# Altium footprint library altiumll.PcbLib: 39 footprints (part 1 of 3)
Each footprint in its own frame and in the unit in brackets; x right, y up, seen from the top. Pads: shape width x height; smd on the part's side, far side on the other; paste and mask are expansions set on the pad; w line width, h text height; cw(c..) or ccw(c..) is an arc to the next point about the centre after c.
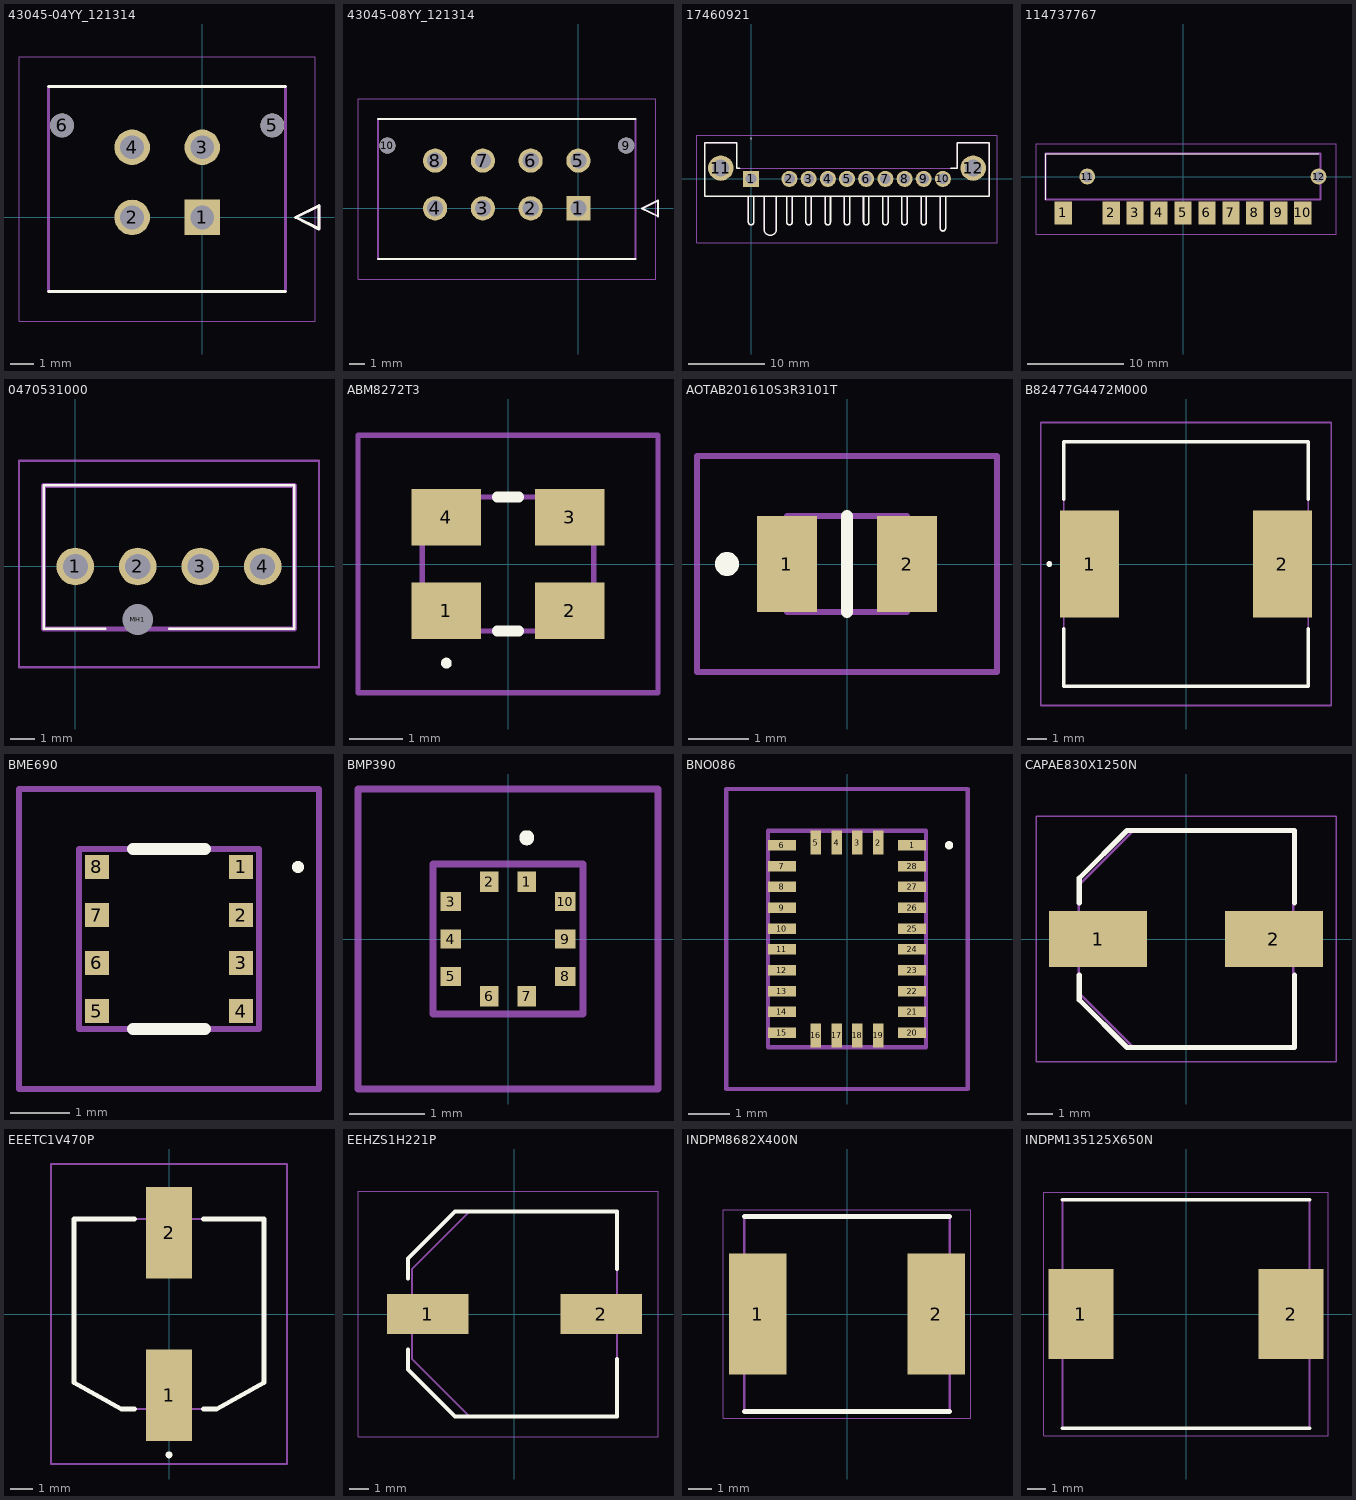
[diagram p0: the footprints below, top view; thin cyan lines are the x and y axes]

## 43045-04YY_121314 [mm]
pads (6):
  rect 1.52x1.52 hole 1.02: 1(0,0)
  round 1.52 hole 1.02: 2(-3,0) 3(0,3) 4(-3,3)
  round 1.02 hole 1.02 unplated: 5(3,3.94) 6(-6,3.94)
Top Overlay:
  lines w0.127: -6.575,-3.17 3.575,-3.17 ; -6.575,5.6 3.575,5.6 ; 4,0 5,-0.5 5,0.5 4,0
Mechanical 13:
  lines w0.127: -6.575,-3.17 3.575,-3.17 3.575,5.6 -6.575,5.6 -6.575,-3.17 ; 4,0 5,-0.5 5,0.5 4,0
Mechanical 15:
  lines w0.05: -7.845,-4.44 4.845,-4.44 4.845,6.87 -7.845,6.87 -7.845,-4.44
3D body "43045-0412.stp": height 9.85, standoff -3.23, extent -6.565,-2.44 3.585,6.33

## 43045-08YY_121314 [mm]
pads (10):
  rect 1.52x1.52 hole 1.02: 1(0,0)
  round 1.52 hole 1.02: 2(-3,0) 3(-6,0) 4(-9,0) 5(0,3) 6(-3,3) 7(-6,3) 8(-9,3)
  round 1.02 hole 1.02 unplated: 9(3,3.94) 10(-12,3.94)
Top Overlay:
  lines w0.127: -12.575,-3.17 3.575,-3.17 ; -12.575,5.6 3.575,5.6 ; 4,0 5,-0.5 5,0.5 4,0
Mechanical 13:
  lines w0.127: -12.575,-3.17 3.575,-3.17 3.575,5.6 -12.575,5.6 -12.575,-3.17 ; 4,0 5,-0.5 5,0.5 4,0
Mechanical 15:
  lines w0.05: -13.845,-4.44 4.845,-4.44 4.845,6.87 -13.845,6.87 -13.845,-4.44
3D body "43045-0812.stp": height 9.83, standoff -3.25, extent -12.575,-2.47 3.575,6.3

## 17460921 [mm]
pads (12):
  rect 2.1x2.1 hole 1.4: 1(0,0)
  round 2.1 hole 1.4: 2(5,0) 3(7.5,0) 4(10,0) 5(12.5,0) 6(15,0) 7(17.5,0) 8(20,0) 9(22.5,0) 10(25,0)
  round 3.3 hole 2.2: 11(-3.95,1.4) 12(28.95,1.4)
Top Overlay:
  lines w0.1: 0,5.2 cw(c0,5.25) 0,5.3 cw(c0,5.25) 0,5.2
  lines w0.2: -1.5,1.4 -1.85,1.4 -1.85,4.7 -6.05,4.7 -6.05,-2.3 31.05,-2.3 31.05,4.7 26.85,4.7 26.85,1.4 26,1.4 ; -0.35,-2.3 -0.35,-5.65 ccw(c0,-5.65) 0.35,-5.65 0.35,-2.3 ; 1.7,-2.3 1.7,-6.55 ccw(c2.5,-6.55) 3.3,-6.55 3.3,-2.3 ; 4.65,-2.3 4.65,-5.65 ccw(c5,-5.65) 5.35,-5.65 5.35,-2.3 ; 7.15,-2.3 7.15,-5.65 ccw(c7.5,-5.65) 7.85,-5.65 7.85,-2.3 ; 9.65,-2.3 9.65,-5.65 ccw(c10,-5.65) 10.35,-5.65 10.35,-2.3 ; 12.15,-2.3 12.15,-5.65 ccw(c12.5,-5.65) 12.85,-5.65 12.85,-2.3 ; 14.65,-2.3 14.65,-5.65 ccw(c15,-5.65) 15.35,-5.65 15.35,-2.3 ; 17.15,-2.3 17.15,-5.65 ccw(c17.5,-5.65) 17.85,-5.65 17.85,-2.3 ; 19.65,-2.3 19.65,-5.65 ccw(c20,-5.65) 20.35,-5.65 20.35,-2.3 ; 22.15,-2.3 22.15,-5.65 ccw(c22.5,-5.65) 22.85,-5.65 22.85,-2.3 ; 24.65,-2.3 24.65,-6.45 ccw(c25,-6.45) 25.35,-6.45 25.35,-2.3
Mechanical 13:
  lines w0.1: -0.35,-2.3 -0.35,-5.65 ccw(c0,-5.65) 0.35,-5.65 0.35,-2.3 ; 1.7,-2.3 1.7,-6.55 ccw(c2.5,-6.55) 3.3,-6.55 3.3,-2.3 ; 4.65,-2.3 4.65,-5.65 ccw(c5,-5.65) 5.35,-5.65 5.35,-2.3 ; 7.15,-2.3 7.15,-5.65 ccw(c7.5,-5.65) 7.85,-5.65 7.85,-2.3 ; 9.65,-2.3 9.65,-5.65 ccw(c10,-5.65) 10.35,-5.65 10.35,-2.3 ; 12.15,-2.3 12.15,-5.65 ccw(c12.5,-5.65) 12.85,-5.65 12.85,-2.3 ; 14.65,-2.3 14.65,-5.65 ccw(c15,-5.65) 15.35,-5.65 15.35,-2.3 ; 17.15,-2.3 17.15,-5.65 ccw(c17.5,-5.65) 17.85,-5.65 17.85,-2.3 ; 19.65,-2.3 19.65,-5.65 ccw(c20,-5.65) 20.35,-5.65 20.35,-2.3 ; 22.15,-2.3 22.15,-5.65 ccw(c22.5,-5.65) 22.85,-5.65 22.85,-2.3 ; 24.65,-2.3 24.65,-6.45 ccw(c25,-6.45) 25.35,-6.45 25.35,-2.3 ; -6.05,-2.3 31.05,-2.3 31.05,4.7 26.85,4.7 26.85,1.4 -1.85,1.4 -1.85,4.7 -6.05,4.7 -6.05,-2.3
Mechanical 15:
  lines w0.1: -7.05,-8.35 32.05,-8.35 32.05,5.7 -7.05,5.7 -7.05,-8.35
3D body "1746092-1.stp": height 4.79, standoff -2.06, extent -6.05,-7.35 31.05,4.7

## 114737767 [mm]
pads (12):
  rect 1.8x2.4 smd: 1(-12.5,-3.8) 2(-7.5,-3.8) 3(-5,-3.8) 4(-2.5,-3.8) 5(0,-3.8) 6(2.5,-3.8) 7(5,-3.8) 8(7.5,-3.8) 9(10,-3.8) 10(12.5,-3.8)
  round 1.65 hole 1.1: 11(-10,0) 12(14.15,0)
Top Overlay:
  lines w0.1: -14.35,-2.4 -14.35,2.4 14.15,2.4
Mechanical 13:
  lines w0.2: -14.35,-2.4 14.35,-2.4 14.35,2.4 -14.35,2.4 -14.35,-2.4
Mechanical 15:
  lines w0.1: -15.35,-6 15.975,-6 15.975,3.4 -15.35,3.4 -15.35,-6
3D body "1-1473776-7.stp": height 6.55, standoff -0.6, extent -16.35,-4.4 16.35,2.4

## 0470531000 [mm]
pads (5):
  round 1.53 hole 1.02: 1(0,0) 2(2.54,0) 3(5.08,0) 4(7.62,0)
  round 0.625 hole 1.25 unplated: MH1(2.54,-2.16)
Top Overlay:
  lines w0.1: 1.21,-2.54 -1.29,-2.54 -1.29,3.3 8.91,3.3 8.91,-2.54 3.81,-2.54
Mechanical 13:
  lines w0.2: -1.29,-2.54 -1.29,3.3 8.91,3.3 8.91,-2.54 -1.29,-2.54
Mechanical 15:
  lines w0.1: -2.29,-4.098 -2.29,4.3 9.91,4.3 9.91,-4.098 -2.29,-4.098
3D body "0470531000.stp": height 9.91, standoff -3.59, extent -1.29,-2.54 8.91,3.3

## ABM8272T3 [mm]
pads (4):
  rect 1.3x1.05 smd: 1(-1.15,-0.875) 2(1.15,-0.875) 3(1.15,0.875) 4(-1.15,0.875)
Top Overlay:
  lines w0.1: -1.15,-1.9 ccw(c-1.15,-1.85) -1.15,-1.8 ccw(c-1.15,-1.85) -1.15,-1.9
  lines w0.2: -0.2,-1.25 0.2,-1.25 ; -0.2,1.25 0.2,1.25
Mechanical 13:
  lines w0.1: -1.6,-1.25 1.6,-1.25 1.6,1.25 -1.6,1.25 -1.6,-1.25
Mechanical 15:
  lines w0.1: -2.8,-2.4 2.8,-2.4 2.8,2.4 -2.8,2.4 -2.8,-2.4
3D body "ABM8-272-T3.stp": height 0.75, standoff 0, extent -1.6,-1.25 1.6,1.25

## AOTAB201610S3R3101T [mm]
pads (2):
  rect 1x1.6 smd: 1(-1,0) 2(1,0)
Top Overlay:
  lines w0.2: 0,-0.8 0,0.8 ; -2,-0.1 cw(c-2,0) -2,0.1 cw(c-2,0) -2,-0.1
Mechanical 13:
  lines w0.1: -1,-0.8 1,-0.8 1,0.8 -1,0.8 -1,-0.8
Mechanical 15:
  lines w0.1: -2.5,-1.8 2.5,-1.8 2.5,1.8 -2.5,1.8 -2.5,-1.8
3D body "AOTA-B201610S3R3-101-T.stp": height 1, standoff 0, extent -1,-0.8 1,0.8

## B82477G4472M000 [mm]
pads (2):
  rect 3.1x5.6 smd: 1(-5.05,0) 2(5.05,0)
Top Overlay:
  lines w0.2: -7.2,0 ccw(c-7.15,0) -7.1,0 ; -7.2,0 cw(c-7.15,0) -7.1,0 ; -7.2,0 ccw(c-7.15,0) -7.1,0 ; -6.4,-6.4 6.4,-6.4 ; -6.4,-6.4 6.4,-6.4 ; -6.4,-6.4 -6.4,-3.4 -6.4,-6.4 ; -6.4,6.4 -6.4,3.4 -6.4,6.4 ; -6.4,6.4 6.4,6.4 ; -6.4,6.4 6.4,6.4 ; 6.4,-6.4 6.4,-3.4 6.4,-6.4 ; 6.4,6.4 6.4,3.4 6.4,6.4
Mechanical 13:
  lines w0.1: -6.4,-6.4 6.4,-6.4 6.4,6.4 -6.4,6.4 -6.4,-6.4
Mechanical 15:
  lines w0.1: -7.6,-7.4 7.6,-7.4 7.6,7.4 -7.6,7.4 -7.6,-7.4
3D body "B82477G4472M000.stp": height 7.56, standoff 0, extent -6,-6 6,6

## BME690 [mm]
pads (8):
  rect 0.4x0.4 smd: 1(1271.2,1271.2) 2(1271.2,1270.4) 3(1271.2,1269.6) 4(1271.2,1268.8) 5(1268.8,1268.8) 6(1268.8,1269.6) 7(1268.8,1270.4) 8(1268.8,1271.2)
Top Overlay:
  lines w0.1: 1272.1,1271.2 cw(c1272.15,1271.2) 1272.2,1271.2 cw(c1272.15,1271.2) 1272.1,1271.2
  lines w0.2: 1269.4,1268.5 1270.6,1268.5 ; 1269.4,1271.5 1270.6,1271.5
Mechanical 13:
  lines w0.1: 1268.5,1268.5 1271.5,1268.5 1271.5,1271.5 1268.5,1271.5 1268.5,1268.5
Mechanical 15:
  lines w0.1: 1267.5,1267.5 1272.5,1267.5 1272.5,1272.5 1267.5,1272.5 1267.5,1267.5
3D body "BME690.stp": height 0.96, standoff 0.01, extent 1268.5,1268.5 1271.5,1271.5

## BMP390 [mm]
pads (10):
  rect 0.25x0.275 smd: 1(0.25,0.763) 2(-0.25,0.763) 6(-0.25,-0.763) 7(0.25,-0.763)
  rect 0.275x0.25 smd: 3(-0.762,0.5) 4(-0.762,0) 5(-0.762,-0.5) 8(0.762,-0.5) 9(0.762,0) 10(0.762,0.5)
Top Overlay:
  lines w0.1: 0.25,1.3 ccw(c0.25,1.35) 0.25,1.4 ccw(c0.25,1.35) 0.25,1.3
Mechanical 13:
  lines w0.1: -1,-1 -1,1 1,1 1,-1 -1,-1
Mechanical 15:
  lines w0.1: -2,-2 -2,2 2,2 2,-2 -2,-2
3D body "BMP390.stp": height 0.73, standoff -0.02, extent -1,-1.08 1,0.92

## BNO086 [mm]
pads (28):
  rect 0.675x0.25 smd: 1(1.562,2.25) 6(-1.562,2.25) 7(-1.562,1.75) 8(-1.562,1.25) 9(-1.562,0.75) 10(-1.562,0.25) 11(-1.562,-0.25) 12(-1.562,-0.75) 13(-1.562,-1.25) 14(-1.562,-1.75) 15(-1.562,-2.25) 20(1.562,-2.25) 21(1.562,-1.75) 22(1.562,-1.25) 23(1.562,-0.75) 24(1.563,-0.25) 25(1.563,0.25) 26(1.562,0.75) 27(1.562,1.25) 28(1.562,1.75)
  rect 0.25x0.575 smd: 2(0.75,2.312) 3(0.25,2.312) 4(-0.25,2.312) 5(-0.75,2.312) 16(-0.75,-2.313) 17(-0.25,-2.313) 18(0.25,-2.313) 19(0.75,-2.313)
Top Overlay:
  lines w0.1: 2.4,2.25 ccw(c2.45,2.25) 2.5,2.25 ccw(c2.45,2.25) 2.4,2.25
Mechanical 13:
  lines w0.1: -1.9,-2.6 -1.9,2.6 1.9,2.6 1.9,-2.6 -1.9,-2.6
Mechanical 15:
  lines w0.1: -2.9,-3.6 -2.9,3.6 2.9,3.6 2.9,-3.6 -2.9,-3.6
3D body "BNO086.stp": height 1.13, standoff 0, extent -1.9,-2.6 1.9,2.6

## CAPAE830X1250N [mm]
pads (2):
  rect 3.8x2.15 smd: 1(-3.4,0) 2(3.4,0)
Top Overlay:
  lines w0.2: -4.127,-1.397 -4.127,-2.349 -2.286,-4.191 4.191,-4.191 4.191,-1.397 ; -4.127,1.397 -4.127,2.349 -2.286,4.191 4.191,4.191 4.191,1.397
Mechanical 13:
  lines w0.1: -4.15,-2.075 -2.075,-4.15 4.15,-4.15 4.15,4.15 -2.075,4.15 -4.15,2.075 -4.15,-2.075
Mechanical 15:
  lines w0.05: -5.8,-4.75 -5.8,4.75 5.8,4.75 5.8,-4.75 -5.8,-4.75
3D body "A768KS337M1ELAS019.stp": height 12.5, standoff 0, extent -4.6,-4.25 4.6,4.25

## EEETC1V470P [mm]
pads (2):
  rect 2x4 smd: 1(0,-3.55) 2(0,3.55)
Top Overlay:
  lines w0.2: -1.5,-4.15 -2.075,-4.15 -4.15,-3 -4.15,4.15 -1.5,4.15 ; 1.5,-4.15 2.075,-4.15 4.15,-3 4.15,4.15 1.5,4.15 ; 0,-6.2 cw(c0,-6.15) 0,-6.1 ; 0,-6.2 ccw(c0,-6.15) 0,-6.1 ; 0,-6.2 cw(c0,-6.15) 0,-6.1
Mechanical 13:
  lines w0.1: -4.15,-3 -4.15,4.15 4.15,4.15 4.15,-3 2.075,-4.15 -2.075,-4.15 -4.15,-3
Mechanical 15:
  lines w0.1: -5.15,-6.55 5.15,-6.55 5.15,6.55 -5.15,6.55 -5.15,-6.55
3D body "EEH-ZL1E471P.stp": height 10.2, standoff 0, extent -4.15,-4.85 4.15,4.85

## EEHZS1H221P [mm]
pads (2):
  rect 4.1x2 smd: 1(-4.35,0) 2(4.35,0)
Top Overlay:
  lines w0.2: -5.334,-1.778 -5.334,-2.794 -2.978,-5.15 5.15,-5.15 5.15,-2.25 ; -5.334,1.778 -5.334,2.794 -2.978,5.15 4.5,5.15 5.15,5.15 5.15,2.25
Mechanical 13:
  lines w0.1: -5.15,2.25 -2.25,5.15 ; -5.15,2.25 -5.15,-2.25 -2.25,-5.15 5.15,-5.15 5.15,5.15 -2.25,5.15 ; -5.15,2.25 -2.25,5.15
Mechanical 15:
  lines w0.05: -7.85,-6.15 7.2,-6.15 7.2,6.15 -7.85,6.15 -7.85,-6.15
3D body "EEH-ZS1E102UP.stp": height 16.5, standoff 0, extent -5.5,-5.15 5.5,5.15

## INDPM8682X400N [mm]
pads (2):
  rect 2.4x5.1 smd: 1(-3.75,0) 2(3.75,0)
Top Overlay:
  lines w0.2: -4.32,-4.09 4.32,-4.09 ; -4.32,4.09 4.32,4.09
Mechanical 13:
  lines w0.1: -4.32,-4.09 -4.32,4.09 4.32,4.09 4.32,-4.09 -4.32,-4.09
Mechanical 15:
  lines w0.05: -5.2,-4.378 -5.2,4.378 5.2,4.378 5.2,-4.378 -5.2,-4.378
3D body "IHLP3232DZER6R8M11.stp": height 3.9, standoff 0, extent -4.3,-4.097 4.3,4.097

## INDPM135125X650N [mm]
pads (2):
  rect 3.55x4.9 smd: 1(-5.75,0) 2(5.75,0)
Top Overlay:
  lines w0.2: -6.75,-6.25 6.75,-6.25 ; -6.75,6.25 6.75,6.25
Mechanical 13:
  lines w0.1: -6.75,-6.25 -6.75,6.25 6.75,6.25 6.75,-6.25 -6.75,-6.25
Mechanical 15:
  lines w0.05: -7.775,-6.65 -7.775,6.65 7.775,6.65 7.775,-6.65 -7.775,-6.65
3D body "PA4343.222NLT.stp": height 6.5, standoff 0, extent -6.75,-6.25 6.75,6.25